# Altium footprint library IMU.PcbLib: 2 footprints
Each footprint in its own frame and in the unit in brackets; x right, y up, seen from the top. Pads: shape width x height; smd on the part's side, far side on the other; paste and mask are expansions set on the pad; w line width, h text height; cw(c..) or ccw(c..) is an arc to the next point about the centre after c.
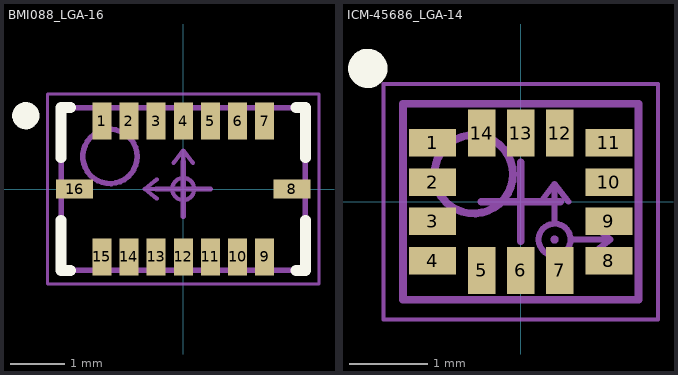
[diagram p0: the footprints below, top view; thin cyan lines are the x and y axes]

## BMI088_LGA-16 [mm] "PQFN, 16-Leads, Body 4.50x3.00mm, Pitch 0.50mm, IPC Medium Density"
height 0.85
pads (16):
  rect 0.35x0.675 smd: 1(-1.5,1.252) 2(-1,1.252) 3(-0.5,1.252) 4(0,1.252) 5(0.5,1.252) 6(1,1.252) 7(1.5,1.252) 9(1.5,-1.252) 10(1,-1.252) 11(0.5,-1.252) 12(0,-1.252) 13(-0.5,-1.252) 14(-1,-1.252) 15(-1.5,-1.252)
  rect 0.675x0.35 smd: 8(2.002,0) 16(-2.002,0)
Top Overlay:
  circle w0.25: c-2.9,1.35 r0.125
  lines w0.2: -2.25,-0.575 -2.25,-1.5 -2.075,-1.5 ; -2.25,0.575 -2.25,1.5 -2.075,1.5 ; 2.075,-1.5 2.25,-1.5 2.25,-0.575 ; 2.075,1.5 2.25,1.5 2.25,0.575
Mechanical 1:
  circle w0.051: c0,0 r0.025
  circle w0.076: c0,0 r0.203
  lines w0.076: -0.483,-0.178 -0.711,0 ; -0.483,0.178 -0.711,0 ; -0.203,0 -0.711,0 ; -0.178,0.483 0,0.711 ; 0,0.203 0,0.711 ; 0.178,0.483 0,0.711
  text "X" at 0.322,0.483 h0.25
  text "Y" at -0.72,-0.559 h0.25
  text "Z" at 0.322,-0.559 h0.25
Top Designator:
  text ".Designator" at -5.998,-0.4 h1.2
Mechanical 13:
  circle w0.1: c-1.35,0.6 r0.5
  lines w0.1: -2.25,-1.5 2.25,-1.5 2.25,1.5 -2.25,1.5 -2.25,-1.5
Mechanical 15:
  lines w0.05: -2.5,-1.75 2.5,-1.75 2.5,1.75 -2.5,1.75 -2.5,-1.75
  lines w0.1: -0.5,0 0.5,0 ; 0,-0.5 0,0.5
3D body "PQFN50P450X300X85-16N.step": height 0.85, standoff 0, extent -2.25,-1.5 2.25,1.5

## ICM-45686_LGA-14 [mm] "PQFN, 14-Leads, Body 3.00x2.50mm, Pitch 0.50mm, IPC Medium Density"
height 0.86
pads (14):
  rect 0.6x0.35 smd: 1(-1.125,0.75) 2(-1.125,0.25) 3(-1.125,-0.25) 4(-1.125,-0.75) 8(1.125,-0.75) 9(1.125,-0.25) 10(1.125,0.25) 11(1.125,0.75)
  rect 0.35x0.6 smd: 5(-0.5,-0.875) 6(0,-0.875) 7(0.5,-0.875) 12(0.5,0.875) 13(0,0.875) 14(-0.5,0.875)
Top Overlay:
  circle w0.25: c-1.95,1.7 r0.125
Mechanical 1:
  circle w0.051: c0.432,-0.483 r0.025
  circle w0.076: c0.432,-0.483 r0.203
  lines w0.076: 0.254,0 0.432,0.229 ; 0.432,-0.279 0.432,0.229 ; 0.61,0 0.432,0.229 ; 0.635,-0.483 1.143,-0.483 ; 0.914,-0.66 1.143,-0.483 ; 0.914,-0.305 1.143,-0.483
  text "X" at 1.008,-1.016 h0.25
  text "Y" at 0.347,0.356 h0.25
  text "Z" at -0.059,-0.61 h0.25
Top Designator:
  text ".Designator" at -5.998,-0.4 h1.2
Mechanical 13:
  circle w0.1: c-0.6,0.35 r0.5
  lines w0.1: -1.5,-1.25 1.5,-1.25 1.5,1.25 -1.5,1.25 -1.5,-1.25
Mechanical 15:
  lines w0.05: -1.75,-1.5 1.75,-1.5 1.75,1.5 -1.75,1.5 -1.75,-1.5
  lines w0.1: -0.5,0 0.5,0 ; 0,-0.5 0,0.5
3D body "PQFN50P300X250X86-14N.step": height 0.86, standoff 0, extent -1.5,-1.25 1.5,1.25